# Altium footprint library Serwomechanizm.PcbLib: 1 footprints
Each footprint in its own frame and in the unit in brackets; x right, y up, seen from the top. Pads: shape width x height; smd on the part's side, far side on the other; paste and mask are expansions set on the pad; w line width, h text height; cw(c..) or ccw(c..) is an arc to the next point about the centre after c.
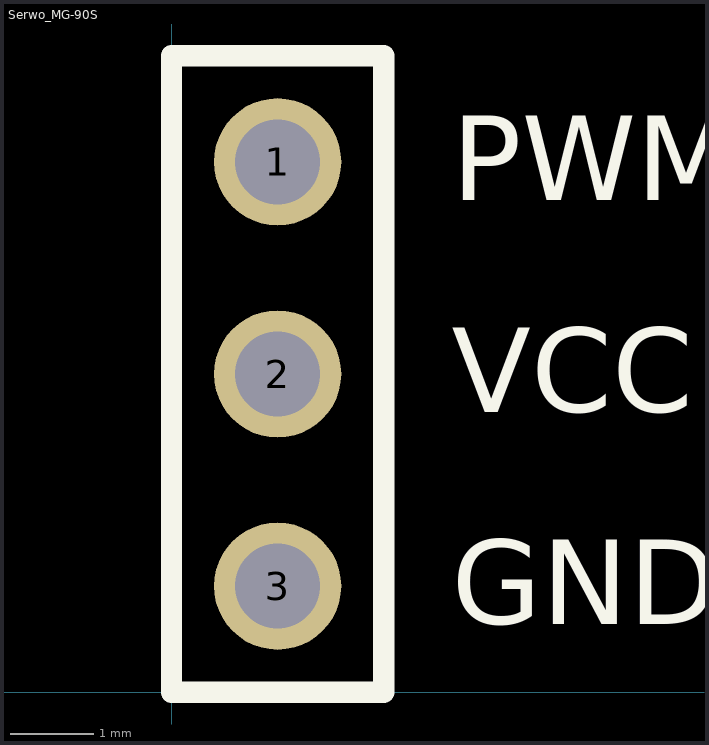
[diagram p0: the footprint, top view; thin cyan lines are the x and y axes]

## Serwo_MG-90S [mil]
pads (3):
  round 60 hole 40: 1(50,250) 2(50,150) 3(50,50)
Top Overlay:
  lines w10: 0,0 100,0 100,300 0,300 0,0
  text "PWM" at 132,232 h40
  text "VCC" at 132,132 h40
  text "GND" at 132,32 h40